# Altium footprint library Footprint-Lib-PhilsLab.PcbLib: 544 footprints (part 13 of 34)
Each footprint in its own frame and in the unit in brackets; x right, y up, seen from the top. Pads: shape width x height; smd on the part's side, far side on the other; paste and mask are expansions set on the pad; w line width, h text height; cw(c..) or ccw(c..) is an arc to the next point about the centre after c.
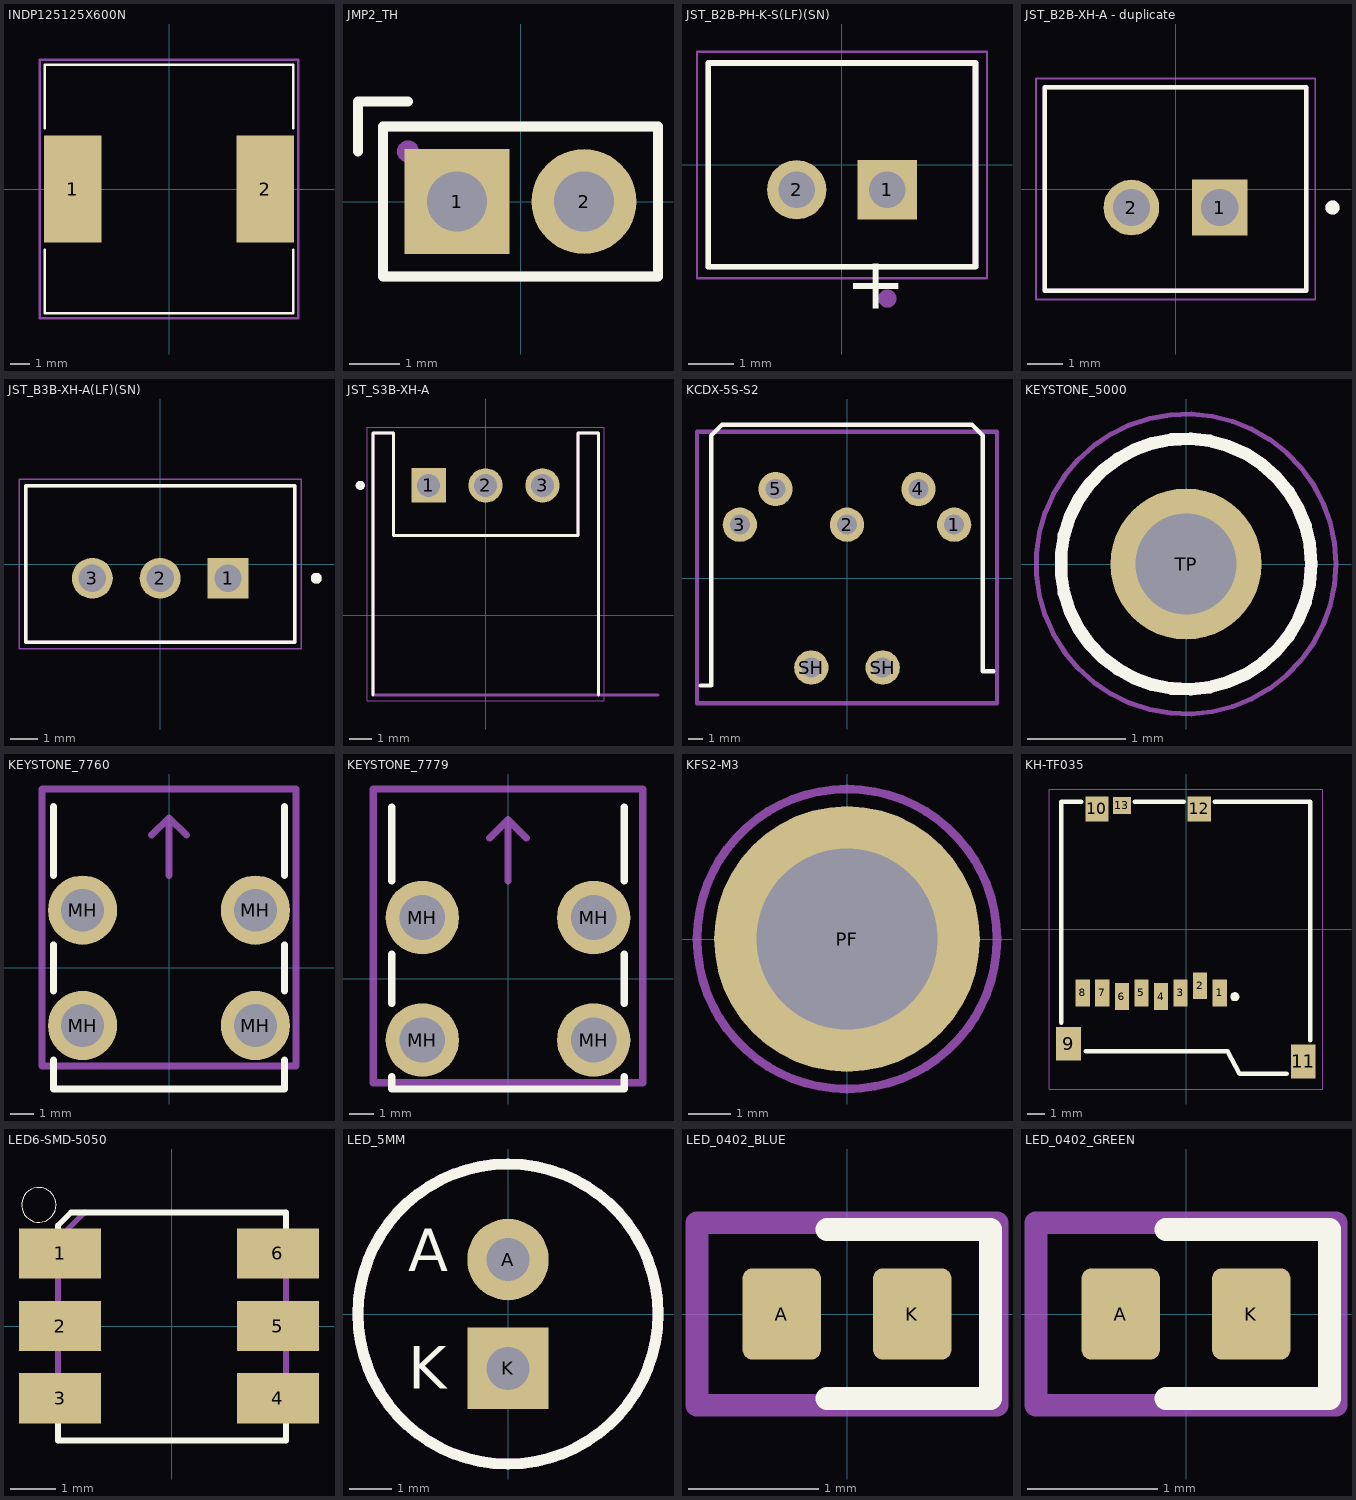
[diagram p12: the footprints below, top view; thin cyan lines are the x and y axes]

## INDP125125X600N [mm]
pads (2):
  rect 2.9x5.4 smd: 1(-4.85,0) 2(4.85,0)
Top Overlay:
  lines w0.127: -6.25,-3.05 -6.25,-6.25 6.25,-6.25 6.25,-3.05 ; -6.25,3.05 -6.25,6.25 6.25,6.25 6.25,3.05
Mechanical 15:
  lines w0.127: -6.5,-6.5 6.5,-6.5 6.5,6.5 -6.5,6.5 -6.5,-6.5
3D body "srr1260-680m.stp": height 6, standoff 0, extent -6.25,-6.5 6.25,6

## JMP2_TH [mm]
pads (2):
  rect 2.1x2.1 hole 1.2: 1(-1.27,0)
  round 2.1 hole 1.2: 2(1.27,0)
Top Overlay:
  lines w0.2: -3.25,1 -3.25,2 -2.25,2 ; -2.75,-1.5 -2.75,1.5 2.75,1.5 2.75,-1.5 -2.75,-1.5
Mechanical 13:
  circle w0.254: c-2.25,1 r0.093
  lines w0.2: -2.75,-1.5 -2.75,1.5 2.75,1.5 2.75,-1.5 -2.75,-1.5
  text ".Designator" at -4.998,-0.333 h1

## JST_B2B-PH-K-S(LF)(SN) [mm]
pads (2):
  rect 1.308x1.308 / inner round 1.308 / far side rect 1.308x1.308 hole 0.8: 1(1,-0.55)
  round 1.308 hole 0.8: 2(-1,-0.55)
Top Overlay:
  lines w0.127: -2.95,-2.25 2.95,-2.25 2.95,2.25 -2.95,2.25 -2.95,-2.25
  text "+" at 1.422,-3.563 h2
Mechanical 13:
  circle w0.2: c1,-2.95 r0.1
  lines w0.127: -2.95,-2.25 -2.95,2.25 2.95,2.25 2.95,-2.25 -2.95,-2.25
Mechanical 15:
  lines w0.05: -3.2,-2.5 -3.2,2.5 3.2,2.5 3.2,-2.5 -3.2,-2.5
3D body "B2B-PH-K-S (LF)(SN)--3DModel-STEP-56544.STEP": height 4.75, standoff -1.75, extent -2.95,-0.7 2.95,5.7

## JST_B2B-XH-A - duplicate [mm]
height 7
pads (2):
  rect 1.575x1.575 / inner round 1.575 / far side rect 1.575x1.575 hole 1.05: 1(1.25,-0.525)
  round 1.575 hole 1.05: 2(-1.25,-0.525)
Top Overlay:
  circle w0.2: c4.44,-0.525 r0.1
  lines w0.127: -3.7,-2.875 -3.7,2.875 3.7,2.875 3.7,-2.875 -3.7,-2.875
Mechanical 13:
  circle w0.2: c4.44,-0.525 r0.1
  lines w0.127: -3.7,-2.875 -3.7,2.875 3.7,2.875 3.7,-2.875 -3.7,-2.875
Mechanical 15:
  lines w0.05: -3.95,-3.125 3.95,-3.125 3.95,3.125 -3.95,3.125 -3.95,-3.125

## JST_B3B-XH-A(LF)(SN) [mm]
height 7
pads (3):
  rect 1.508x1.508 / inner round 1.508 / far side rect 1.508x1.508 hole 1: 1(2.5,-0.525)
  round 1.508 hole 1: 2(0,-0.525) 3(-2.5,-0.525)
Top Overlay:
  circle w0.2: c5.75,-0.525 r0.1
  lines w0.127: -4.95,-2.875 -4.95,2.875 4.95,2.875 4.95,-2.875 -4.95,-2.875
Mechanical 13:
  circle w0.2: c5.75,-0.525 r0.1
  lines w0.127: -4.95,-2.875 -4.95,2.875 4.95,2.875 4.95,-2.875 -4.95,-2.875
Mechanical 15:
  lines w0.05: -5.2,-3.125 -5.2,3.125 5.2,3.125 5.2,-3.125 -5.2,-3.125
3D body "step_temp.STEP": height 7, standoff -3.4, extent -4.95,-2.875 4.95,2.875

## JST_S3B-XH-A [mm]
pads (3):
  rect 1.508x1.508 / inner round 1.508 / far side rect 1.508x1.508 hole 1: 1(-2.5,5.7)
  round 1.508 hole 1: 2(0,5.7) 3(2.5,5.7)
Top Overlay:
  circle w0.2: c-5.5,5.7 r0.1
  lines w0.127: -4.95,-3.5 -4.95,8 -4.05,8 -4.05,3.5 4.05,3.5 4.05,8 4.95,8 4.95,-3.5
Mechanical 13:
  circle w0.2: c-5.5,5.7 r0.1
  lines w0.127: 7.57,-3.5 4.95,-3.5 ; 4.95,-3.5 -4.95,-3.5 -4.95,8 -4.05,8 -4.05,3.5 4.05,3.5 4.05,8 4.95,8 4.95,-3.5
  text "PCB Edge" at 5.417,-3.203 h0.81
Mechanical 15:
  lines w0.05: -5.2,-3.75 -5.2,8.25 5.2,8.25 5.2,-3.75 -5.2,-3.75
3D body "step_temp.STEP": height 6.1, standoff -3.4, extent -4.95,-3.5 4.95,8

## KCDX-5S-S2 [mm]
pads (7):
  round 2.4 hole 1.4: 1(7.5,3.75) 2(0,3.75) 3(-7.5,3.75) 4(5,6.25) 5(-5,6.25) SH(-2.5,-6.25) SH(2.5,-6.25)
Top Overlay:
  lines w0.3: -10.25,-7.5 -9.5,-7.5 -9.5,10 -8.75,10.75 0.25,10.75 8.75,10.75 9.5,10 9.5,-6.5 10.25,-6.5
Mechanical 13:
  lines w0.3: -10.5,-8.75 10.5,-8.75 10.5,10.25 -10.5,10.25 -10.5,-8.75
  text ".Designator" at -4.998,-0.333 h1
3D body "KCDX-5S-N2.STEP": height 19.51, standoff -3.99, extent -10.5,-8.75 10.5,10.25

## KEYSTONE_5000 [mm]
height 4.57
pads (1):
  round 1.53 hole 1.02: TP(0,0)
Top Overlay:
  circle w0.127: c0,0 r1.27
Mechanical 13:
  circle w0.127: c0,0 r1.27
Mechanical 15:
  circle w0.05: c0,0 r1.52
3D body "step_temp.STEP": height 4.57, standoff -3.05, extent -1.27,-1.27 1.27,1.27

## KEYSTONE_7760 [mm]
pads (4):
  round 3 hole 1.85 paste-2539.97: MH(-3.745,-2.5) MH(-3.745,2.5) MH(3.745,-2.5) MH(3.745,2.5)
Top Overlay:
  lines w0.3: -5,-4 -5,-5.25 5,-5.25 5,-4 ; -5,-1 -5,1 ; -5,4 -5,7 ; 5,-1 5,1 ; 5,4 5,7
Mechanical 13:
  lines w0.3: -0.75,5.75 0,6.5 ; 0,4 0,6.5 ; 0.75,5.75 0,6.5 ; 0,6.5 0,6.5 ; 0,6.5 0,6.5 ; -5.5,-4.25 5.5,-4.25 5.5,7.75 -5.5,7.75 -5.5,-4.25
  text "'.Designator'" at -5.815,-0.9 h1
3D body "Keystone-7760.STEP": height 7.99, standoff -5.02, extent -4.707,-4.023 4.707,7.5

## KEYSTONE_7779 [mm]
pads (4):
  round 3 hole 1.85 paste-2539.97: MH(-3.5,-2.5) MH(-3.5,2.5) MH(3.5,-2.5) MH(3.5,2.5)
Top Overlay:
  lines w0.3: -4.75,-4 -4.75,-4.5 4.75,-4.5 4.75,-4 ; -4.75,-1 -4.75,1 ; -4.75,4 -4.75,7 ; 4.75,-1 4.75,1 ; 4.75,4 4.75,7
Mechanical 13:
  lines w0.3: -0.75,5.75 0,6.5 ; 0,4 0,6.5 ; 0.75,5.75 0,6.5 ; 0,6.5 0,6.5 ; 0,6.5 0,6.5 ; -5.5,-4.25 -5.5,7.75 5.5,7.75 5.5,-4.25 -5.5,-4.25
  text "'.Designator'" at -5.815,-0.9 h1
3D body "keystone-PN7779.STEP": height 7.99, standoff -5.02, extent -5.2,-4.009 5.2,7.5

## KFS2-M3 [mm]
pads (1):
  round 6.2 hole 4.22: PF(0,0)
Mechanical 13:
  lines w0.2: -3.5,0 cw(c0,0) 0,3.5 cw(c0,0) 3.5,0 cw(c0,0) 0,-3.5 cw(c0,0) -3.5,0
  text "PRESS-FIT" at -2.274,1.1 h0.5
  text "'.Designator'" at -5.815,-0.9 h1
3D body "KFS2-M3.stp": height 1.51, standoff -1.52, extent -2.78,-2.78 2.781,2.78

## KH-TF035 [mm] "Card Slot Self-bouncing SMD SD Card / Memory Card Connector ROHS"
pads (13):
  rect 0.8x1.5 smd: 1(1.87,-3.57) 2(0.77,-3.17) 3(-0.33,-3.57) 4(-1.43,-3.77) 5(-2.53,-3.57) 6(-3.63,-3.77) 7(-4.73,-3.57) 8(-5.83,-3.57)
  rect 1.4x1.9 smd: 9(-6.63,-6.42) 11(6.57,-7.42)
  rect 1.3x1.4 smd: 10(-5.03,6.78) 12(0.72,6.78)
  rect 1x0.95 smd: 13(-3.63,6.98)
Top Overlay:
  circle w0.254: c2.72,-3.78 r0.127
  lines w0.254: -7.04,-5.239 -7.04,7.17 -5.911,7.17 ; -5.66,-6.85 2.31,-6.85 2.99,-8.11 5.63,-8.11 ; -2.899,7.17 -0.161,7.17 ; 1.601,7.17 6.96,7.17 6.96,-6.239
Mechanical 15:
  lines w0.051: -7.71,-8.97 7.66,-8.97 7.66,7.9 -7.71,7.9 -7.71,-8.97

## LED6-SMD-5050 [mm]
pads (6):
  rect 1.8x1.1 smd: 1(-2.456,1.604) 2(-2.456,0.01) 3(-2.456,-1.574) 4(2.326,-1.574) 5(2.326,0.01) 6(2.326,1.604)
Top Overlay:
  circle w0: c-2.921,2.667 r0.381
  lines w0.127: -2.5,-2 -2.5,-2.5 2.5,-2.5 2.5,-2 ; -2.5,2 -2.5,2.217 -2.217,2.5 2.5,2.5 2.5,2
Mechanical 13:
  lines w0.127: -2.5,-2.5 -2.5,1.921 -1.921,2.5 ; 2.5,-2.5 2.5,2.5
3D body "step_temp.STEP": height 1.62, standoff 0, extent -2.7,-2.5 2.7,2.5

## LED_5MM [mm]
pads (2):
  round 1.9 hole 1: A(0,1.27)
  rect 1.9x1.9 hole 1: K(0,-1.27)
Top Overlay:
  circle w0.254: c0,0 r3.5
  text "A" at -2.333,1 h1
  text "K" at -2.333,-1.75 h1
Bottom Overlay:
  circle w0.254: c0,0 r3.5
  text "K" at -1.667,-1.75 h1
  text "A" at -1.667,1 h1
Mechanical 13:
  circle w0.254: c0,0 r3.5
  text "'.Designator'" at -5.665,-0.417 h1
  text "A" at -0.333,1 h1
  text "K" at -0.333,-1.75 h1
3D body "LED-5mm.STEP": height 21.8, standoff -14, extent -3,-2.5 3,3

## LED_0402_BLUE [mm]
pads (2):
  rrect25% 0.6x0.7 smd: A(-0.5,0) K(0.5,0)
Top Overlay:
  lines w0.175: -0.153,-0.647 1.1,-0.647 1.1,0.647 -0.153,0.647
Mechanical 13:
  lines w0.175: -1.15,-0.7 1.15,-0.7 1.15,0.7 -1.15,0.7 -1.15,-0.7
  text "'.Designator'" at -5.665,-0.29 h1
  text "+" at -1.883,0.508 h0.5
3D body "LED0402-Blue.step": height 0.45, standoff 0, extent -0.505,-0.25 0.505,0.25

## LED_0402_GREEN [mm]
pads (2):
  rrect25% 0.6x0.7 smd: A(-0.5,0) K(0.5,0)
Top Overlay:
  lines w0.175: -0.153,-0.647 1.1,-0.647 1.1,0.647 -0.153,0.647
Mechanical 13:
  lines w0.175: -1.15,-0.7 -1.15,0.7 1.15,0.7 1.15,-0.7 -1.15,-0.7
  text "'.Designator'" at -5.665,-0.29 h1
  text "+" at -1.883,0.508 h0.5
3D body "LED0402-Green.step": height 0.45, standoff 0, extent -0.505,-0.25 0.505,0.25